# Altium footprint library FG28C0G2A681JNT00.PcbLib: 2 footprints
Each footprint in its own frame and in the unit in brackets; x right, y up, seen from the top. Pads: shape width x height; smd on the part's side, far side on the other; paste and mask are expansions set on the pad; w line width, h text height; cw(c..) or ccw(c..) is an arc to the next point about the centre after c.
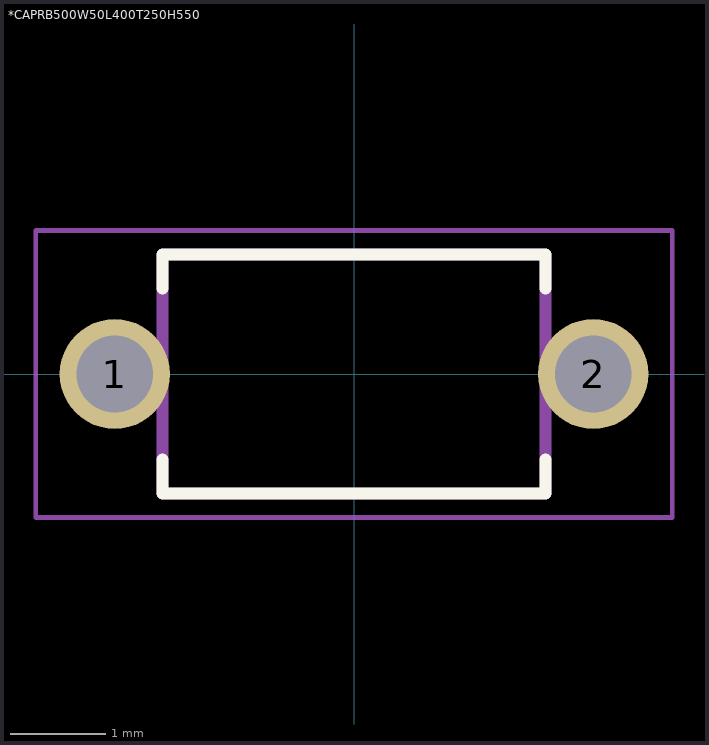
[diagram p0: the footprints below, top view; thin cyan lines are the x and y axes]

## *CAPRB500W50L400T250H550 [mm]
pads (2):
  round 1.15 hole 0.8: 1(-2.5,0) 2(2.5,0)
Top Overlay:
  lines w0.127: -2,-0.895 -2,-1.25 2,-1.25 2,-0.895 ; -2,0.895 -2,1.25 2,1.25 2,0.895
Mechanical 13:
  lines w0.127: -2,-1.25 2,-1.25 ; -2,-1.25 -2,1.25 ; -2,-1.25 2,-1.25 ; -2,-1.25 -2,1.25 ; -2,1.25 2,1.25 ; -2,1.25 2,1.25 ; 2,-1.25 2,1.25 ; 2,-1.25 2,1.25
Mechanical 15:
  lines w0.05: -3.325,-1.5 3.325,-1.5 3.325,1.5 -3.325,1.5 -3.325,-1.5

## PCBComponent_1 [mm]